# Altium footprint library FootPrintLib_1.PcbLib: 498 footprints (part 28 of 35)
Each footprint in its own frame and in the unit in brackets; x right, y up, seen from the top. Pads: shape width x height; smd on the part's side, far side on the other; paste and mask are expansions set on the pad; w line width, h text height; cw(c..) or ccw(c..) is an arc to the next point about the centre after c.
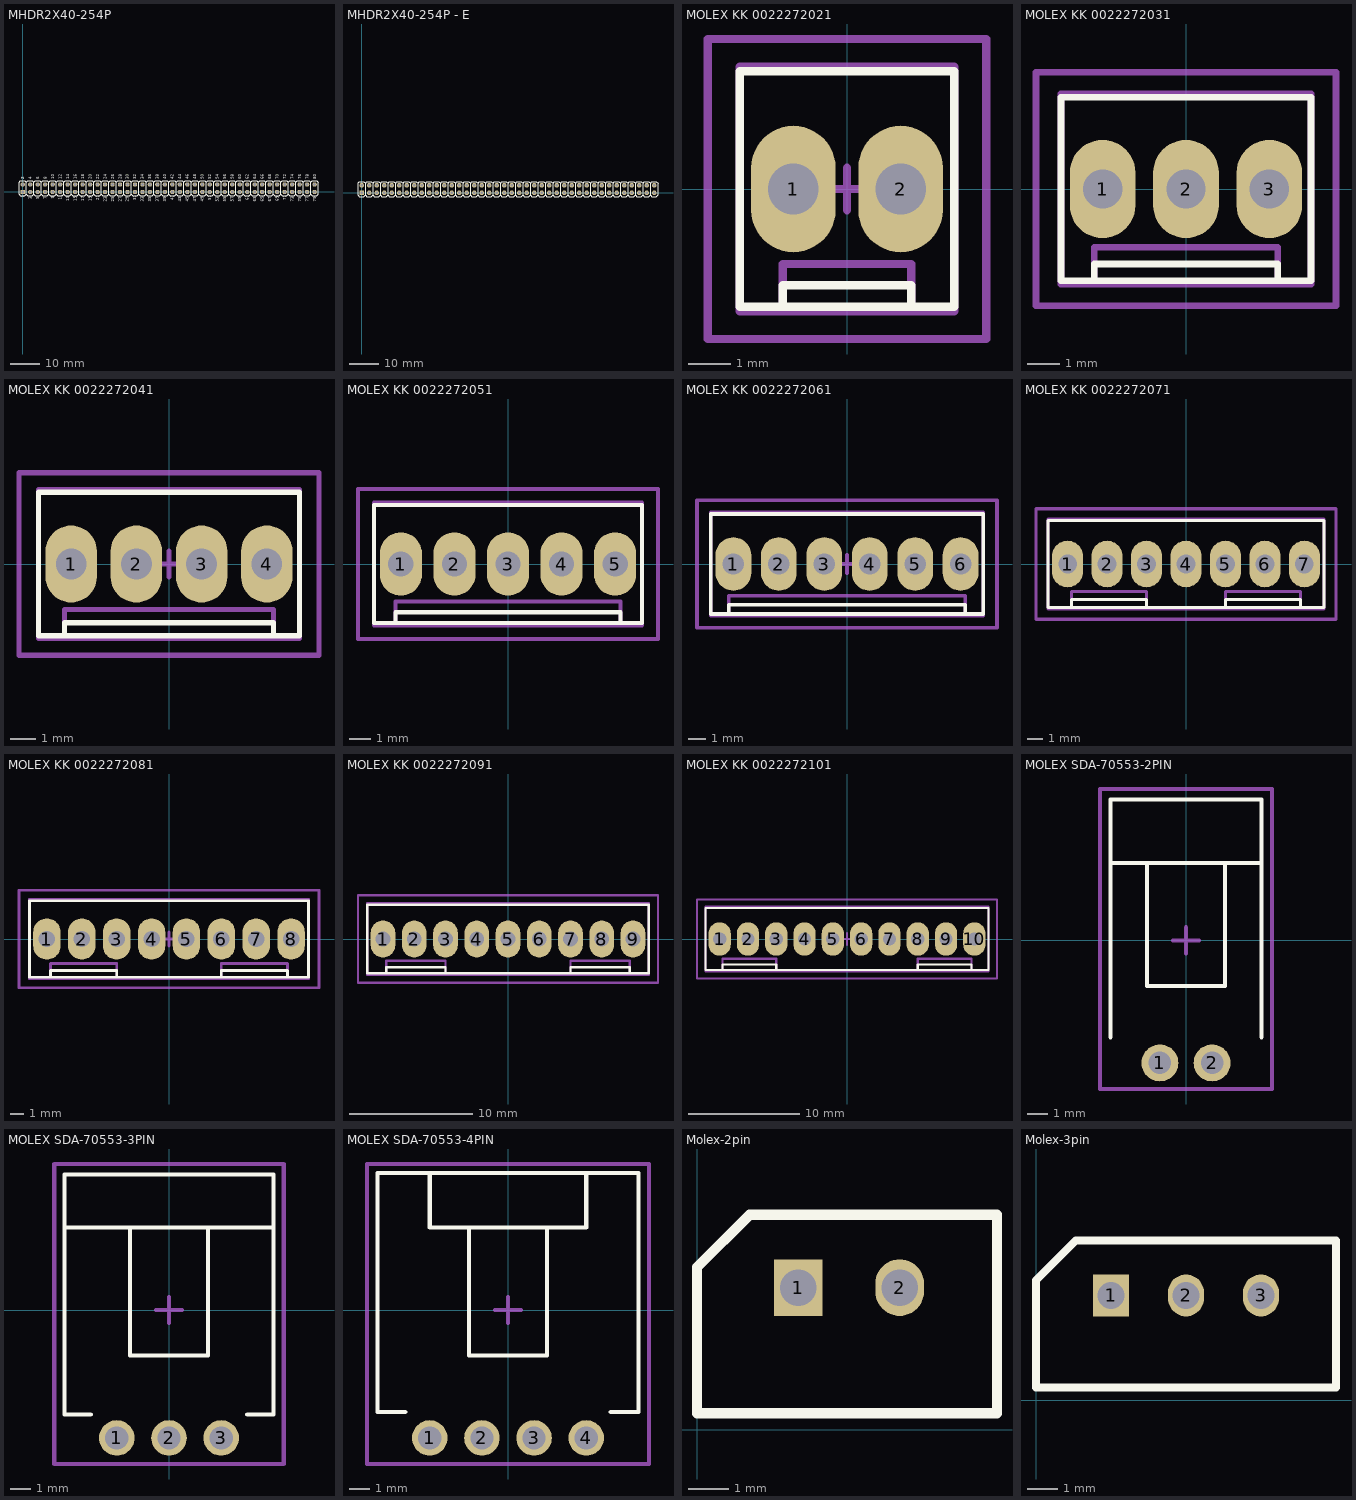
[diagram p27: the footprints below, top view; thin cyan lines are the x and y axes]

## MHDR2X40-254P [mm] "Male Header 2X40 with 2.54 mm Pitch"
pads (80):
  rect 1.5x1.5 hole 0.9: 1(0,0)
  round 1.5 hole 0.9: 2(0,2.54) 3(2.54,0) 4(2.54,2.54) 5(5.08,0) 6(5.08,2.54) 7(7.62,0) 8(7.62,2.54) 9(10.16,0) 10(10.16,2.54) 11(12.7,0) 12(12.7,2.54) 13(15.24,0) 14(15.24,2.54) 15(17.78,0) 16(17.78,2.54) 17(20.32,0) 18(20.32,2.54) 19(22.86,0) 20(22.86,2.54) 21(25.4,0) 22(25.4,2.54) 23(27.94,0) 24(27.94,2.54) 25(30.48,0) 26(30.48,2.54) 27(33.02,0) 28(33.02,2.54) 29(35.56,0) 30(35.56,2.54) 31(38.1,0) 32(38.1,2.54) 33(40.64,0) 34(40.64,2.54) 35(43.18,0) 36(43.18,2.54) 37(45.72,0) 38(45.72,2.54) 39(48.26,0) 40(48.26,2.54) 41(50.8,0) 42(50.8,2.54) 43(53.34,0) 44(53.34,2.54) 45(55.88,0) 46(55.88,2.54) 47(58.42,0) 48(58.42,2.54) 49(60.96,0) 50(60.96,2.54) 51(63.5,0) 52(63.5,2.54) 53(66.04,0) 54(66.04,2.54) 55(68.58,0) 56(68.58,2.54) 57(71.12,0) 58(71.12,2.54) 59(73.66,0) 60(73.66,2.54) 61(76.2,0) 62(76.2,2.54) 63(78.74,0) 64(78.74,2.54) 65(81.28,0) 66(81.28,2.54) 67(83.82,0) 68(83.82,2.54) 69(86.36,0) 70(86.36,2.54) 71(88.9,0) 72(88.9,2.54) 73(91.44,0) 74(91.44,2.54) 75(93.98,0) 76(93.98,2.54) 77(96.52,0) 78(96.52,2.54) 79(99.06,0) 80(99.06,2.54)
Top Overlay:
  drawing of 281 lines, arcs and shapes, not listed
  text "1" at 0.508,-1.983 h1
  text "2" at 0.508,4.318 h1
  text "2" at 0.508,4.318 h1
  text "1" at 0.508,-1.983 h1
  text "4" at 3.048,4.318 h1
  text "3" at 3.048,-2.412 h1
  text "6" at 5.588,4.318 h1
  text "5" at 5.588,-2.412 h1
  text "8" at 8.128,4.318 h1
  text "7" at 8.128,-2.412 h1
  text "10" at 10.668,4.318 h1
  text "9" at 10.668,-2.364 h1
  text "12" at 13.208,4.318 h1
  text "11" at 13.208,-2.716 h1
  text "14" at 15.748,4.318 h1
  text "13" at 15.748,-3.145 h1
  text "16" at 18.288,4.318 h1
  text "15" at 18.288,-3.145 h1
  text "18" at 20.828,4.318 h1
  text "17" at 20.828,-3.145 h1
  text "20" at 23.368,4.318 h1
  text "19" at 23.368,-3.097 h1
  text "22" at 25.908,4.318 h1
  text "21" at 25.908,-2.874 h1
  text "24" at 28.448,4.318 h1
  text "23" at 28.448,-3.302 h1
  text "26" at 30.988,4.318 h1
  text "25" at 30.988,-3.302 h1
  text "28" at 33.528,4.318 h1
  text "27" at 33.528,-3.302 h1
  text "30" at 36.068,4.318 h1
  text "29" at 36.068,-3.254 h1
  text "32" at 38.608,4.318 h1
  text "31" at 38.608,-2.874 h1
  text "34" at 41.148,4.318 h1
  text "33" at 41.148,-3.302 h1
  text "36" at 43.688,4.318 h1
  text "35" at 43.688,-3.302 h1
  text "38" at 46.228,4.318 h1
  text "37" at 46.228,-3.302 h1
  text "40" at 48.768,4.318 h1
  text "39" at 48.768,-3.254 h1
  text "42" at 51.308,4.318 h1
  text "41" at 51.308,-2.874 h1
  text "44" at 53.848,4.318 h1
  text "43" at 53.848,-3.302 h1
  text "46" at 56.388,4.318 h1
  text "45" at 56.388,-3.302 h1
  text "48" at 58.928,4.318 h1
  text "47" at 58.928,-3.302 h1
  text "50" at 61.468,4.318 h1
  text "49" at 61.468,-3.254 h1
  text "52" at 64.008,4.318 h1
  text "51" at 64.008,-2.874 h1
  text "54" at 66.548,4.318 h1
  text "53" at 66.548,-3.302 h1
  text "56" at 69.088,4.318 h1
  text "55" at 69.088,-3.302 h1
  text "58" at 71.628,4.318 h1
  text "57" at 71.628,-3.302 h1
  text "60" at 74.168,4.318 h1
  text "59" at 74.168,-3.254 h1
  text "62" at 76.708,4.318 h1
  text "61" at 76.708,-2.821 h1
  text "64" at 79.248,4.318 h1
  text "63" at 79.248,-3.25 h1
  text "66" at 81.788,4.318 h1
  text "65" at 81.788,-3.25 h1
  text "68" at 84.328,4.318 h1
  text "67" at 84.328,-3.25 h1
  text "70" at 86.868,4.318 h1
  text "69" at 86.868,-3.202 h1
  text "72" at 89.408,4.318 h1
  text "71" at 89.408,-2.874 h1
  text "74" at 91.948,4.318 h1
  text "73" at 91.948,-3.302 h1
  text "76" at 94.488,4.318 h1
  text "75" at 94.488,-3.302 h1
  text "78" at 97.028,4.318 h1
  text "77" at 97.028,-3.302 h1
  text "80" at 99.568,4.318 h1
  text "79" at 99.568,-3.254 h1
3D body "PIN.STEP": height 8.43, standoff -2.49, extent -1.27,-1.27 1.27,1.27
3D body "PIN_mid.STEP": height 8.43, standoff -2.49, extent 3.81,1.27 6.35,3.81
3D body "PIN_mid.STEP": height 8.43, standoff -2.49, extent 6.35,1.27 8.89,3.81
3D body "PIN_mid.STEP": height 8.43, standoff -2.49, extent 8.89,1.27 11.43,3.81
3D body "PIN_mid.STEP": height 8.43, standoff -2.49, extent 11.43,1.27 13.97,3.81
3D body "PIN_mid.STEP": height 8.43, standoff -2.49, extent 13.97,1.27 16.51,3.81
3D body "PIN_mid.STEP": height 8.43, standoff -2.49, extent 16.51,1.27 19.05,3.81
3D body "PIN_mid.STEP": height 8.43, standoff -2.49, extent 19.05,1.27 21.59,3.81
3D body "PIN_mid.STEP": height 8.43, standoff -2.49, extent 21.59,1.27 24.13,3.81
3D body "PIN_mid.STEP": height 8.43, standoff -2.49, extent 24.13,1.27 26.67,3.81
3D body "PIN_mid.STEP": height 8.43, standoff -2.49, extent 26.67,1.27 29.21,3.81
3D body "PIN_mid.STEP": height 8.43, standoff -2.49, extent 29.21,1.27 31.75,3.81
3D body "PIN_mid.STEP": height 8.43, standoff -2.49, extent 31.75,1.27 34.29,3.81
3D body "PIN_mid.STEP": height 8.43, standoff -2.49, extent 34.29,1.27 36.83,3.81
3D body "PIN_mid.STEP": height 8.43, standoff -2.49, extent 36.83,1.27 39.37,3.81
3D body "PIN_mid.STEP": height 8.43, standoff -2.49, extent 39.37,1.27 41.91,3.81
3D body "PIN_mid.STEP": height 8.43, standoff -2.49, extent 41.91,1.27 44.45,3.81
3D body "PIN_mid.STEP": height 8.43, standoff -2.49, extent 44.45,1.27 46.99,3.81
3D body "PIN_mid.STEP": height 8.43, standoff -2.49, extent 46.99,1.27 49.53,3.81
3D body "PIN_mid.STEP": height 8.43, standoff -2.49, extent 49.53,1.27 52.07,3.81
3D body "PIN_mid.STEP": height 8.43, standoff -2.49, extent 52.07,1.27 54.61,3.81
3D body "PIN_mid.STEP": height 8.43, standoff -2.49, extent 54.61,1.27 57.15,3.81
3D body "PIN_mid.STEP": height 8.43, standoff -2.49, extent 57.15,1.27 59.69,3.81
3D body "PIN_mid.STEP": height 8.43, standoff -2.49, extent 59.69,1.27 62.23,3.81
3D body "PIN_mid.STEP": height 8.43, standoff -2.49, extent 62.23,1.27 64.77,3.81
3D body "PIN_mid.STEP": height 8.43, standoff -2.49, extent 64.77,1.27 67.31,3.81
3D body "PIN_mid.STEP": height 8.43, standoff -2.49, extent 67.31,1.27 69.85,3.81
3D body "PIN_mid.STEP": height 8.43, standoff -2.49, extent 69.85,1.27 72.39,3.81
3D body "PIN_mid.STEP": height 8.43, standoff -2.49, extent 72.39,1.27 74.93,3.81
3D body "PIN_mid.STEP": height 8.43, standoff -2.49, extent 74.93,1.27 77.47,3.81
3D body "PIN_mid.STEP": height 8.43, standoff -2.49, extent 77.47,1.27 80.01,3.81
3D body "PIN_mid.STEP": height 8.43, standoff -2.49, extent 80.01,1.27 82.55,3.81
3D body "PIN_mid.STEP": height 8.43, standoff -2.49, extent 82.55,1.27 85.09,3.81
3D body "PIN_mid.STEP": height 8.43, standoff -2.49, extent 85.09,1.27 87.63,3.81
3D body "PIN_mid.STEP": height 8.43, standoff -2.49, extent 87.63,1.27 90.17,3.81
3D body "PIN_mid.STEP": height 8.43, standoff -2.49, extent 90.17,1.27 92.71,3.81
3D body "PIN_mid.STEP": height 8.43, standoff -2.49, extent 92.71,1.27 95.25,3.81
3D body "PIN_mid.STEP": height 8.43, standoff -2.49, extent 95.25,1.27 97.79,3.81
3D body "PIN_mid.STEP": height 8.43, standoff -2.49, extent 1.27,1.27 3.81,3.81
3D body "PIN_mid.STEP": height 8.43, standoff -2.49, extent 1.27,-1.27 3.81,1.27
3D body "PIN_mid.STEP": height 8.43, standoff -2.49, extent 3.81,-1.27 6.35,1.27
3D body "PIN_mid.STEP": height 8.43, standoff -2.49, extent 6.35,-1.27 8.89,1.27
3D body "PIN_mid.STEP": height 8.43, standoff -2.49, extent 8.89,-1.27 11.43,1.27
3D body "PIN_mid.STEP": height 8.43, standoff -2.49, extent 11.43,-1.27 13.97,1.27
3D body "PIN_mid.STEP": height 8.43, standoff -2.49, extent 13.97,-1.27 16.51,1.27
3D body "PIN_mid.STEP": height 8.43, standoff -2.49, extent 16.51,-1.27 19.05,1.27
3D body "PIN_mid.STEP": height 8.43, standoff -2.49, extent 19.05,-1.27 21.59,1.27
3D body "PIN_mid.STEP": height 8.43, standoff -2.49, extent 21.59,-1.27 24.13,1.27
3D body "PIN_mid.STEP": height 8.43, standoff -2.49, extent 24.13,-1.27 26.67,1.27
3D body "PIN_mid.STEP": height 8.43, standoff -2.49, extent 26.67,-1.27 29.21,1.27
3D body "PIN_mid.STEP": height 8.43, standoff -2.49, extent 29.21,-1.27 31.75,1.27
3D body "PIN_mid.STEP": height 8.43, standoff -2.49, extent 31.75,-1.27 34.29,1.27
3D body "PIN_mid.STEP": height 8.43, standoff -2.49, extent 34.29,-1.27 36.83,1.27
3D body "PIN_mid.STEP": height 8.43, standoff -2.49, extent 36.83,-1.27 39.37,1.27
3D body "PIN_mid.STEP": height 8.43, standoff -2.49, extent 39.37,-1.27 41.91,1.27
3D body "PIN_mid.STEP": height 8.43, standoff -2.49, extent 41.91,-1.27 44.45,1.27
3D body "PIN_mid.STEP": height 8.43, standoff -2.49, extent 44.45,-1.27 46.99,1.27
3D body "PIN_mid.STEP": height 8.43, standoff -2.49, extent 46.99,-1.27 49.53,1.27
3D body "PIN_mid.STEP": height 8.43, standoff -2.49, extent 49.53,-1.27 52.07,1.27
3D body "PIN_mid.STEP": height 8.43, standoff -2.49, extent 52.07,-1.27 54.61,1.27
3D body "PIN_mid.STEP": height 8.43, standoff -2.49, extent 54.61,-1.27 57.15,1.27
3D body "PIN_mid.STEP": height 8.43, standoff -2.49, extent 57.15,-1.27 59.69,1.27
3D body "PIN_mid.STEP": height 8.43, standoff -2.49, extent 59.69,-1.27 62.23,1.27
3D body "PIN_mid.STEP": height 8.43, standoff -2.49, extent 62.23,-1.27 64.77,1.27
3D body "PIN_mid.STEP": height 8.43, standoff -2.49, extent 64.77,-1.27 67.31,1.27
3D body "PIN_mid.STEP": height 8.43, standoff -2.49, extent 67.31,-1.27 69.85,1.27
3D body "PIN_mid.STEP": height 8.43, standoff -2.49, extent 69.85,-1.27 72.39,1.27
3D body "PIN_mid.STEP": height 8.43, standoff -2.49, extent 72.39,-1.27 74.93,1.27
3D body "PIN_mid.STEP": height 8.43, standoff -2.49, extent 74.93,-1.27 77.47,1.27
3D body "PIN_mid.STEP": height 8.43, standoff -2.49, extent 77.47,-1.27 80.01,1.27
3D body "PIN_mid.STEP": height 8.43, standoff -2.49, extent 80.01,-1.27 82.55,1.27
3D body "PIN_mid.STEP": height 8.43, standoff -2.49, extent 82.55,-1.27 85.09,1.27
3D body "PIN_mid.STEP": height 8.43, standoff -2.49, extent 85.09,-1.27 87.63,1.27
3D body "PIN_mid.STEP": height 8.43, standoff -2.49, extent 87.63,-1.27 90.17,1.27
3D body "PIN_mid.STEP": height 8.43, standoff -2.49, extent 90.17,-1.27 92.71,1.27
3D body "PIN_mid.STEP": height 8.43, standoff -2.49, extent 92.71,-1.27 95.25,1.27
3D body "PIN_mid.STEP": height 8.43, standoff -2.49, extent 95.25,-1.27 97.79,1.27
3D body "PIN.STEP": height 8.43, standoff -2.49, extent -1.27,1.27 1.27,3.81
3D body "PIN.STEP": height 8.43, standoff -2.49, extent 97.79,1.27 100.33,3.81
3D body "PIN.STEP": height 8.43, standoff -2.49, extent 97.79,-1.27 100.33,1.27

## MHDR2X40-254P - E [mm] "Male Header 2X40 with 2.54 mm Pitch"
pads (80):
  rect 1.5x1.5 hole 0.9: 1(0,0)
  round 1.5 hole 0.9: 2(0,2.54) 3(2.54,0) 4(2.54,2.54) 5(5.08,0) 6(5.08,2.54) 7(7.62,0) 8(7.62,2.54) 9(10.16,0) 10(10.16,2.54) 11(12.7,0) 12(12.7,2.54) 13(15.24,0) 14(15.24,2.54) 15(17.78,0) 16(17.78,2.54) 17(20.32,0) 18(20.32,2.54) 19(22.86,0) 20(22.86,2.54) 21(25.4,0) 22(25.4,2.54) 23(27.94,0) 24(27.94,2.54) 25(30.48,0) 26(30.48,2.54) 27(33.02,0) 28(33.02,2.54) 29(35.56,0) 30(35.56,2.54) 31(38.1,0) 32(38.1,2.54) 33(40.64,0) 34(40.64,2.54) 35(43.18,0) 36(43.18,2.54) 37(45.72,0) 38(45.72,2.54) 39(48.26,0) 40(48.26,2.54) 41(50.8,0) 42(50.8,2.54) 43(53.34,0) 44(53.34,2.54) 45(55.88,0) 46(55.88,2.54) 47(58.42,0) 48(58.42,2.54) 49(60.96,0) 50(60.96,2.54) 51(63.5,0) 52(63.5,2.54) 53(66.04,0) 54(66.04,2.54) 55(68.58,0) 56(68.58,2.54) 57(71.12,0) 58(71.12,2.54) 59(73.66,0) 60(73.66,2.54) 61(76.2,0) 62(76.2,2.54) 63(78.74,0) 64(78.74,2.54) 65(81.28,0) 66(81.28,2.54) 67(83.82,0) 68(83.82,2.54) 69(86.36,0) 70(86.36,2.54) 71(88.9,0) 72(88.9,2.54) 73(91.44,0) 74(91.44,2.54) 75(93.98,0) 76(93.98,2.54) 77(96.52,0) 78(96.52,2.54) 79(99.06,0) 80(99.06,2.54)
Top Overlay:
  drawing of 281 lines, arcs and shapes, not listed
3D body "PIN.STEP": height 8.43, standoff -2.49, extent 97.79,-1.27 100.33,1.27
3D body "PIN.STEP": height 8.43, standoff -2.49, extent 97.79,1.27 100.33,3.81
3D body "PIN.STEP": height 8.43, standoff -2.49, extent -1.27,1.27 1.27,3.81
3D body "PIN_mid.STEP": height 8.43, standoff -2.49, extent 95.25,-1.27 97.79,1.27
3D body "PIN_mid.STEP": height 8.43, standoff -2.49, extent 92.71,-1.27 95.25,1.27
3D body "PIN_mid.STEP": height 8.43, standoff -2.49, extent 90.17,-1.27 92.71,1.27
3D body "PIN_mid.STEP": height 8.43, standoff -2.49, extent 87.63,-1.27 90.17,1.27
3D body "PIN_mid.STEP": height 8.43, standoff -2.49, extent 85.09,-1.27 87.63,1.27
3D body "PIN_mid.STEP": height 8.43, standoff -2.49, extent 82.55,-1.27 85.09,1.27
3D body "PIN_mid.STEP": height 8.43, standoff -2.49, extent 80.01,-1.27 82.55,1.27
3D body "PIN_mid.STEP": height 8.43, standoff -2.49, extent 77.47,-1.27 80.01,1.27
3D body "PIN_mid.STEP": height 8.43, standoff -2.49, extent 74.93,-1.27 77.47,1.27
3D body "PIN_mid.STEP": height 8.43, standoff -2.49, extent 72.39,-1.27 74.93,1.27
3D body "PIN_mid.STEP": height 8.43, standoff -2.49, extent 69.85,-1.27 72.39,1.27
3D body "PIN_mid.STEP": height 8.43, standoff -2.49, extent 67.31,-1.27 69.85,1.27
3D body "PIN_mid.STEP": height 8.43, standoff -2.49, extent 64.77,-1.27 67.31,1.27
3D body "PIN_mid.STEP": height 8.43, standoff -2.49, extent 62.23,-1.27 64.77,1.27
3D body "PIN_mid.STEP": height 8.43, standoff -2.49, extent 59.69,-1.27 62.23,1.27
3D body "PIN_mid.STEP": height 8.43, standoff -2.49, extent 57.15,-1.27 59.69,1.27
3D body "PIN_mid.STEP": height 8.43, standoff -2.49, extent 54.61,-1.27 57.15,1.27
3D body "PIN_mid.STEP": height 8.43, standoff -2.49, extent 52.07,-1.27 54.61,1.27
3D body "PIN_mid.STEP": height 8.43, standoff -2.49, extent 49.53,-1.27 52.07,1.27
3D body "PIN_mid.STEP": height 8.43, standoff -2.49, extent 46.99,-1.27 49.53,1.27
3D body "PIN_mid.STEP": height 8.43, standoff -2.49, extent 44.45,-1.27 46.99,1.27
3D body "PIN_mid.STEP": height 8.43, standoff -2.49, extent 41.91,-1.27 44.45,1.27
3D body "PIN_mid.STEP": height 8.43, standoff -2.49, extent 39.37,-1.27 41.91,1.27
3D body "PIN_mid.STEP": height 8.43, standoff -2.49, extent 36.83,-1.27 39.37,1.27
3D body "PIN_mid.STEP": height 8.43, standoff -2.49, extent 34.29,-1.27 36.83,1.27
3D body "PIN_mid.STEP": height 8.43, standoff -2.49, extent 31.75,-1.27 34.29,1.27
3D body "PIN_mid.STEP": height 8.43, standoff -2.49, extent 29.21,-1.27 31.75,1.27
3D body "PIN_mid.STEP": height 8.43, standoff -2.49, extent 26.67,-1.27 29.21,1.27
3D body "PIN_mid.STEP": height 8.43, standoff -2.49, extent 24.13,-1.27 26.67,1.27
3D body "PIN_mid.STEP": height 8.43, standoff -2.49, extent 21.59,-1.27 24.13,1.27
3D body "PIN_mid.STEP": height 8.43, standoff -2.49, extent 19.05,-1.27 21.59,1.27
3D body "PIN_mid.STEP": height 8.43, standoff -2.49, extent 16.51,-1.27 19.05,1.27
3D body "PIN_mid.STEP": height 8.43, standoff -2.49, extent 13.97,-1.27 16.51,1.27
3D body "PIN_mid.STEP": height 8.43, standoff -2.49, extent 11.43,-1.27 13.97,1.27
3D body "PIN_mid.STEP": height 8.43, standoff -2.49, extent 8.89,-1.27 11.43,1.27
3D body "PIN_mid.STEP": height 8.43, standoff -2.49, extent 6.35,-1.27 8.89,1.27
3D body "PIN_mid.STEP": height 8.43, standoff -2.49, extent 3.81,-1.27 6.35,1.27
3D body "PIN_mid.STEP": height 8.43, standoff -2.49, extent 1.27,-1.27 3.81,1.27
3D body "PIN_mid.STEP": height 8.43, standoff -2.49, extent 1.27,1.27 3.81,3.81
3D body "PIN_mid.STEP": height 8.43, standoff -2.49, extent 95.25,1.27 97.79,3.81
3D body "PIN_mid.STEP": height 8.43, standoff -2.49, extent 92.71,1.27 95.25,3.81
3D body "PIN_mid.STEP": height 8.43, standoff -2.49, extent 90.17,1.27 92.71,3.81
3D body "PIN_mid.STEP": height 8.43, standoff -2.49, extent 87.63,1.27 90.17,3.81
3D body "PIN_mid.STEP": height 8.43, standoff -2.49, extent 85.09,1.27 87.63,3.81
3D body "PIN_mid.STEP": height 8.43, standoff -2.49, extent 82.55,1.27 85.09,3.81
3D body "PIN_mid.STEP": height 8.43, standoff -2.49, extent 80.01,1.27 82.55,3.81
3D body "PIN_mid.STEP": height 8.43, standoff -2.49, extent 77.47,1.27 80.01,3.81
3D body "PIN_mid.STEP": height 8.43, standoff -2.49, extent 74.93,1.27 77.47,3.81
3D body "PIN_mid.STEP": height 8.43, standoff -2.49, extent 72.39,1.27 74.93,3.81
3D body "PIN_mid.STEP": height 8.43, standoff -2.49, extent 69.85,1.27 72.39,3.81
3D body "PIN_mid.STEP": height 8.43, standoff -2.49, extent 67.31,1.27 69.85,3.81
3D body "PIN_mid.STEP": height 8.43, standoff -2.49, extent 64.77,1.27 67.31,3.81
3D body "PIN_mid.STEP": height 8.43, standoff -2.49, extent 62.23,1.27 64.77,3.81
3D body "PIN_mid.STEP": height 8.43, standoff -2.49, extent 59.69,1.27 62.23,3.81
3D body "PIN_mid.STEP": height 8.43, standoff -2.49, extent 57.15,1.27 59.69,3.81
3D body "PIN_mid.STEP": height 8.43, standoff -2.49, extent 54.61,1.27 57.15,3.81
3D body "PIN_mid.STEP": height 8.43, standoff -2.49, extent 52.07,1.27 54.61,3.81
3D body "PIN_mid.STEP": height 8.43, standoff -2.49, extent 49.53,1.27 52.07,3.81
3D body "PIN_mid.STEP": height 8.43, standoff -2.49, extent 46.99,1.27 49.53,3.81
3D body "PIN_mid.STEP": height 8.43, standoff -2.49, extent 44.45,1.27 46.99,3.81
3D body "PIN_mid.STEP": height 8.43, standoff -2.49, extent 41.91,1.27 44.45,3.81
3D body "PIN_mid.STEP": height 8.43, standoff -2.49, extent 39.37,1.27 41.91,3.81
3D body "PIN_mid.STEP": height 8.43, standoff -2.49, extent 36.83,1.27 39.37,3.81
3D body "PIN_mid.STEP": height 8.43, standoff -2.49, extent 34.29,1.27 36.83,3.81
3D body "PIN_mid.STEP": height 8.43, standoff -2.49, extent 31.75,1.27 34.29,3.81
3D body "PIN_mid.STEP": height 8.43, standoff -2.49, extent 29.21,1.27 31.75,3.81
3D body "PIN_mid.STEP": height 8.43, standoff -2.49, extent 26.67,1.27 29.21,3.81
3D body "PIN_mid.STEP": height 8.43, standoff -2.49, extent 24.13,1.27 26.67,3.81
3D body "PIN_mid.STEP": height 8.43, standoff -2.49, extent 21.59,1.27 24.13,3.81
3D body "PIN_mid.STEP": height 8.43, standoff -2.49, extent 19.05,1.27 21.59,3.81
3D body "PIN_mid.STEP": height 8.43, standoff -2.49, extent 16.51,1.27 19.05,3.81
3D body "PIN_mid.STEP": height 8.43, standoff -2.49, extent 13.97,1.27 16.51,3.81
3D body "PIN_mid.STEP": height 8.43, standoff -2.49, extent 11.43,1.27 13.97,3.81
3D body "PIN_mid.STEP": height 8.43, standoff -2.49, extent 8.89,1.27 11.43,3.81
3D body "PIN_mid.STEP": height 8.43, standoff -2.49, extent 6.35,1.27 8.89,3.81
3D body "PIN_mid.STEP": height 8.43, standoff -2.49, extent 3.81,1.27 6.35,3.81
3D body "PIN.STEP": height 8.43, standoff -2.49, extent -1.27,-1.27 1.27,1.27

## MOLEX KK 0022272021 [mm]
height 11.6
pads (2):
  oval 2x3 hole 1.2: 1(-1.27,0) 2(1.27,0)
Top Overlay:
  lines w0.2: -1.524,-2.794 -1.524,-2.286 1.524,-2.286 1.524,-2.794 ; -2.54,-2.794 2.54,-2.794 2.54,2.794 -2.54,2.794 -2.54,-2.794
Mechanical 13:
  lines w0.2: -1.524,-2.9 -1.524,-1.778 1.524,-1.778 1.524,-2.9 ; -2.54,-2.9 2.54,-2.9 2.54,2.9 -2.54,2.9 -2.54,-2.9
Mechanical 15:
  lines w0.2: -0.508,0 0.508,0 ; 0,-0.508 0,0.508 ; -3.302,-3.556 -1.016,-3.556 3.302,-3.556 3.302,-1.016 3.302,3.556 -3.302,3.556 -3.302,-3.556
3D body "MOLEX KK 022272021.STEP": height 11.7, standoff -3.56, extent -2.54,-2.9 2.54,2.9

## MOLEX KK 0022272031 [mm]
height 11.6
pads (3):
  oval 2x3 hole 1.2: 1(-2.54,0) 2(0,0) 3(2.54,0)
Top Overlay:
  lines w0.2: -2.794,-2.794 -2.794,-2.286 2.794,-2.286 2.794,-2.794 ; -3.81,-2.794 3.81,-2.794 3.81,2.794 -3.81,2.794 -3.81,-2.794
Mechanical 13:
  lines w0.2: -2.794,-2.9 -2.794,-1.778 2.794,-1.778 2.794,-2.9 ; -3.81,-2.9 -3.81,2.9 3.81,2.9 3.81,-2.9 -3.81,-2.9
Mechanical 15:
  lines w0.2: -0.508,0 0.508,0 ; 0,-0.508 0,0.508 ; -4.572,-3.556 -4.572,3.556 4.572,3.556 4.572,-1.016 4.572,-3.556 -2.286,-3.556 -4.572,-3.556
3D body "MOLEX KK 022272031.STEP": height 11.7, standoff -3.56, extent -3.81,-2.9 3.81,2.9

## MOLEX KK 0022272041 [mm]
height 11.6
pads (4):
  oval 2x3 hole 1.2: 1(-3.81,0) 2(-1.27,0) 3(1.27,0) 4(3.81,0)
Top Overlay:
  lines w0.2: -4.064,-2.794 -4.064,-2.286 4.064,-2.286 4.064,-2.794 ; -5.08,-2.794 5.08,-2.794 5.08,2.794 -5.08,2.794 -5.08,-2.794
Mechanical 13:
  lines w0.2: -4.064,-2.9 -4.064,-1.778 4.064,-1.778 4.064,-2.9 ; -5.08,-2.9 -5.08,2.9 5.08,2.9 5.08,-2.9 -5.08,-2.9
Mechanical 15:
  lines w0.2: -0.508,0 0.508,0 ; 0,-0.508 0,0.508 ; -5.842,-3.556 -5.842,3.556 5.842,3.556 5.842,-1.016 5.842,-3.556 -3.556,-3.556 -5.842,-3.556
3D body "MOLEX KK 022272041.STEP": height 11.7, standoff -3.56, extent -5.08,-2.9 5.08,2.9

## MOLEX KK 0022272051 [mm]
height 11.6
pads (5):
  oval 2x3 hole 1.2: 1(-5.08,0) 2(-2.54,0) 3(0,0) 4(2.54,0) 5(5.08,0)
Top Overlay:
  lines w0.2: -5.334,-2.794 -5.334,-2.286 5.334,-2.286 5.334,-2.794 ; -6.35,-2.794 -6.35,2.794 6.35,2.794 6.35,-2.794 -6.35,-2.794
Mechanical 13:
  lines w0.2: -5.334,-2.9 -5.334,-1.778 5.334,-1.778 5.334,-2.9 ; -6.35,-2.9 6.35,-2.9 6.35,2.9 -6.35,2.9 -6.35,-2.9
Mechanical 15:
  lines w0.2: -0.508,0 0.508,0 ; 0,-0.508 0,0.508 ; -7.112,-3.556 7.112,-3.556 7.112,-1.016 7.112,3.556 -7.112,3.556 -7.112,-3.556
3D body "MOLEX KK 022272051.STEP": height 11.7, standoff -3.56, extent -6.35,-2.9 6.35,2.9

## MOLEX KK 0022272061 [mm]
height 11.6
pads (6):
  oval 2x3 hole 1.2: 1(-6.35,0) 2(-3.81,0) 3(-1.27,0) 4(1.27,0) 5(3.81,0) 6(6.35,0)
Top Overlay:
  lines w0.2: -6.604,-2.794 -6.604,-2.286 6.604,-2.286 6.604,-2.794 ; -7.62,-2.794 7.62,-2.794 7.62,2.794 -7.62,2.794 -7.62,-2.794
Mechanical 13:
  lines w0.2: -6.604,-2.9 -6.604,-1.778 6.604,-1.778 6.604,-2.9 ; -7.62,-2.9 -7.62,2.9 7.62,2.9 7.62,-2.9 -7.62,-2.9
Mechanical 15:
  lines w0.2: -0.508,0 0.508,0 ; 0,-0.508 0,0.508 ; -8.382,-3.556 -8.382,3.556 8.382,3.556 8.382,-1.016 8.382,-3.556 -8.382,-3.556
3D body "MOLEX KK 022272061.STEP": height 11.7, standoff -3.56, extent -7.62,-2.9 7.62,2.9

## MOLEX KK 0022272071 [mm]
height 11.6
pads (7):
  oval 2x3 hole 1.2: 1(-7.62,0) 2(-5.08,0) 3(-2.54,0) 4(0,0) 5(2.54,0) 6(5.08,0) 7(7.62,0)
Top Overlay:
  lines w0.2: -7.366,-2.794 -7.366,-2.286 -2.54,-2.286 -2.54,-2.794 ; 2.54,-2.794 2.54,-2.286 7.366,-2.286 7.366,-2.794 ; -8.89,-2.794 8.89,-2.794 8.89,2.794 -8.89,2.794 -8.89,-2.794
Mechanical 13:
  lines w0.2: -7.366,-2.9 -7.366,-1.778 -2.54,-1.778 -2.54,-2.9 ; 2.54,-2.9 2.54,-1.778 7.366,-1.778 7.366,-2.9 ; -8.89,-2.9 -8.89,2.9 8.89,2.9 8.89,-2.9 -8.89,-2.9
Mechanical 15:
  lines w0.2: -0.508,0 0.508,0 ; 0,-0.508 0,0.508 ; -9.652,-3.556 -9.652,3.556 9.652,3.556 9.652,-1.016 9.652,-3.556 -9.652,-3.556
3D body "MOLEX KK 022272071.STEP": height 11.7, standoff -3.56, extent -8.89,-2.9 8.89,2.9

## MOLEX KK 0022272081 [mm]
height 11.6
pads (8):
  oval 2x3 hole 1.2: 1(-8.89,0) 2(-6.35,0) 3(-3.81,0) 4(-1.27,0) 5(1.27,0) 6(3.81,0) 7(6.35,0) 8(8.89,0)
Top Overlay:
  lines w0.2: -8.636,-2.794 -8.636,-2.286 -3.81,-2.286 -3.81,-2.794 ; 3.81,-2.794 3.81,-2.286 8.636,-2.286 8.636,-2.794 ; -10.16,-2.794 -10.16,2.794 10.16,2.794 10.16,-2.794 -10.16,-2.794
Mechanical 13:
  lines w0.2: -8.636,-2.9 -8.636,-1.778 -3.81,-1.778 -3.81,-2.9 ; 3.81,-2.9 3.81,-1.778 8.636,-1.778 8.636,-2.9 ; -10.16,-2.9 10.16,-2.9 10.16,2.9 -10.16,2.9 -10.16,-2.9
Mechanical 15:
  lines w0.2: -0.508,0 0.508,0 ; 0,-0.508 0,0.508 ; -10.922,-3.556 10.922,-3.556 10.922,-1.016 10.922,3.556 -10.922,3.556 -10.922,-3.556
3D body "MOLEX KK 022272081.STEP": height 11.7, standoff -3.56, extent -10.16,-2.9 10.16,2.9

## MOLEX KK 0022272091 [mm]
height 11.6
pads (9):
  oval 2x3 hole 1.2: 1(-10.16,0) 2(-7.62,0) 3(-5.08,0) 4(-2.54,0) 5(0,0) 6(2.54,0) 7(5.08,0) 8(7.62,0) 9(10.16,0)
Top Overlay:
  lines w0.2: -9.906,-2.794 -9.906,-2.286 -5.08,-2.286 -5.08,-2.794 ; 5.08,-2.794 5.08,-2.286 9.906,-2.286 9.906,-2.794 ; -11.43,-2.794 -11.43,2.794 11.43,2.794 11.43,-2.794 -11.43,-2.794
Mechanical 13:
  lines w0.2: -9.906,-2.9 -9.906,-1.778 -5.08,-1.778 -5.08,-2.9 ; 5.08,-2.9 5.08,-1.778 9.906,-1.778 9.906,-2.9 ; -11.43,-2.9 11.43,-2.9 11.43,2.9 -11.43,2.9 -11.43,-2.9
Mechanical 15:
  lines w0.2: -0.508,0 0.508,0 ; 0,-0.508 0,0.508 ; -12.192,-3.556 12.192,-3.556 12.192,-1.016 12.192,3.556 -12.192,3.556 -12.192,-3.556
3D body "MOLEX KK 022272091.STEP": height 11.7, standoff -3.56, extent -11.43,-2.9 11.43,2.9

## MOLEX KK 0022272101 [mm]
height 11.6
pads (10):
  oval 2x3 hole 1.2: 1(-11.43,0) 2(-8.89,0) 3(-6.35,0) 4(-3.81,0) 5(-1.27,0) 6(1.27,0) 7(3.81,0) 8(6.35,0) 9(8.89,0) 10(11.43,0)
Top Overlay:
  lines w0.2: -11.176,-2.794 -11.176,-2.286 -6.35,-2.286 -6.35,-2.794 ; 6.35,-2.794 6.35,-2.286 11.176,-2.286 11.176,-2.794 ; -12.7,-2.794 -12.7,2.794 12.7,2.794 12.7,-2.794 -12.7,-2.794
Mechanical 13:
  lines w0.2: -11.176,-2.9 -11.176,-1.778 -6.35,-1.778 -6.35,-2.9 ; 6.35,-2.9 6.35,-1.778 11.176,-1.778 11.176,-2.9 ; -12.7,-2.9 12.7,-2.9 12.7,2.9 -12.7,2.9 -12.7,-2.9
Mechanical 15:
  lines w0.2: -0.508,0 0.508,0 ; 0,-0.508 0,0.508 ; -13.462,-3.556 13.462,-3.556 13.462,-1.016 13.462,3.556 -13.462,3.556 -13.462,-3.556
3D body "MOLEX KK 022272101.STEP": height 11.7, standoff -3.56, extent -12.7,-2.9 12.7,2.9

## MOLEX SDA-70553-2PIN [mm] "SL Right angle header with latch, 0.100 centres, SDA-70553"
height 6.99
pads (2):
  round 1.8 hole 1.09: 1(-1.27,-5.969) 2(1.27,-5.969)
Top Overlay:
  lines w0.2: -3.683,-4.719 -3.683,6.858 3.683,6.858 3.683,-4.719 ; -3.627,3.765 3.683,3.765 ; -1.905,3.765 -1.905,-2.219 1.905,-2.219 1.905,3.765
Mechanical 15:
  lines w0.2: -0.635,0 0.635,0 ; 0,-0.635 0,0.635 ; -4.191,-7.239 4.191,-7.239 4.191,7.366 -4.191,7.366 -4.191,-7.239
3D body "705530001.STEP": height 6.96, standoff -3.32, extent -3.683,-6.719 3.683,6.87

## MOLEX SDA-70553-3PIN [mm] "SL Right Angle Header W/LAtch & Trip-Pegs 2.54mm Centres"
height 6.99
pads (3):
  round 1.73 hole 1.13: 1(-2.54,-6.223) 2(0,-6.223) 3(2.54,-6.223)
Top Overlay:
  lines w0.2: -5.08,4.019 5.08,4.019 ; -3.81,-5.08 -5.08,-5.08 -5.08,6.604 5.08,6.604 5.08,-5.08 3.81,-5.08 ; -1.905,4.019 -1.905,-2.219 1.905,-2.219 1.905,4.019
Mechanical 15:
  lines w0.2: -0.635,0 0.635,0 ; 0,-0.635 0,0.635 ; -5.588,-7.493 -4.953,-7.493 5.588,-7.493 5.588,7.112 -5.588,7.112 -5.588,-7.493
3D body "705530002.STEP": height 6.98, standoff -3.3, extent -5.08,-6.923 5.08,6.666

## MOLEX SDA-70553-4PIN [mm] "SL Right Angle Header W/LAtch & Trip-Pegs 2.54mm Centres"
height 6.99
pads (4):
  round 1.73 hole 1.13: 1(-3.81,-6.223) 2(-1.27,-6.223) 3(1.27,-6.223) 4(3.81,-6.223)
Top Overlay:
  lines w0.2: -5,-4.953 -6.35,-4.953 -6.35,6.677 6.35,6.677 6.35,-4.953 5,-4.953 ; -3.81,6.677 -3.81,4.019 3.81,4.019 3.81,6.677 ; -1.905,4.019 -1.905,-2.219 1.905,-2.219 1.905,4.019
Mechanical 15:
  lines w0.2: -0.635,0 0.635,0 ; 0,-0.635 0,0.635 ; -6.858,-7.493 -6.858,7.112 6.858,7.112 6.858,-7.493 -6.858,-7.493
3D body "705530003.STEP": height 6.98, standoff -3.3, extent -6.35,-6.923 6.35,6.666

## Molex-2pin [mm] "Molex-2pin"
pads (2):
  rect 1.2x1.4 hole 0.9: 1(2.5,3.5)
  oval 1.2x1.4 hole 0.9: 2(5,3.5)
Top Overlay:
  lines w0.254: 0,0.4 0,4 1.3,5.3 7.4,5.3 7.4,0.4 0,0.4
3D body "User Library-Molex_22-03-5025.STEP": height 2.95, standoff -6.45, extent 0,0.43 7.4,5.33

## Molex-3pin [mm] "Molex-3pin"
pads (3):
  rect 1.2x1.4 hole 0.9: 1(2.5,3.5)
  oval 1.2x1.4 hole 0.9: 2(5,3.5) 3(7.5,3.5)
Top Overlay:
  lines w0.254: 0,0.43 0,4 1.33,5.33 10,5.33 10,0.43 0,0.43
3D body "molex3.stp": height 5.95, standoff -3.45, extent 0.05,0.43 9.95,5.33